# Altium schematic symbol library C0402C101J5GAC.SchLib: 1 symbol
Pins are listed as number, name and electrical type; pins without a type are passive.

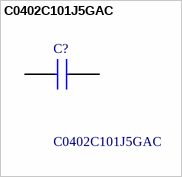
[diagram p0: symbol C0402C101J5GAC]

## C0402C101J5GAC
designator C?
Multilayer Ceramic Capacitors MLCC - SMD/SMT 50volts 100pF 5% C0G; Manufacturer_Name: Yageo Group; Geometry.Height: 0.55mm; Mouser Part Number: 80-C0402C101J5GAC; Mouser Price/Stock: https://www.mouser.co.uk/ProductDetail/KEMET/C0402C101J5GAC?qs=cr8T4Ugre44Eq9iZl6w%252BvA%3D%3D; Manufacturer_Part_Number: C0402C101J5GAC; Datasheet Link: https://content.kemet.com/datasheets/KEM_C1002_X7R_SMD.pdf
footprint C0402C104J4RACTU
pins: 1, 2